# EAGLE library part 2173157-3_2173157-3 (library HA_FONA_LARA_20)
Conn Micro USB 2.0 Type B RCP 5 POS 0.65mm Solder RA SMD 5 Terminal 1 Port T/R Check prices <https://pricing.snapeda.com/search/part/2173157-3/?ref=eda>
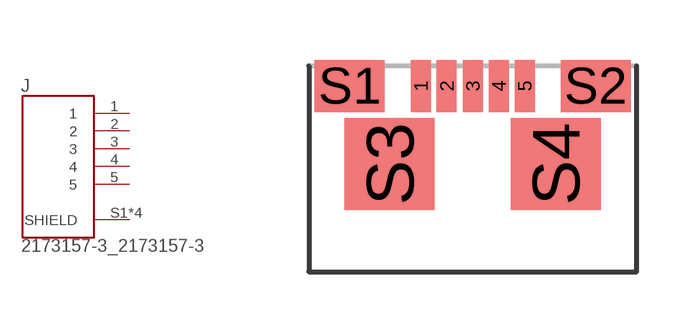
[diagram p0: symbol with the pads of 2173157-3_CONN_2173157-3; footprint 2173157-3_CONN_2173157-3]

Designator prefix J

## 2173157-3_2173157-3 (AVAILABILITY: Good; CENTERLINE_PITCH: .65 mm[.025 in]; COMMENT: 2173157-3; DESCRIPTION: Conn Micro USB 2.0 Type B RCP 5 POS 0.65mm Solder RA SMD 5 Terminal 1 Port T/R; EU_ROHS_COMPLIANCE: Compliant; MF: TE Connectivity; MP: 2173157-3; NUMBER_OF_POSITIONS: 5; PACKAGE: None; PRICE: None; PRODUCT_TYPE: Connector; PURCHASE-URL: https://pricing.snapeda.com/search/part/2173157-3/?ref=eda)  [2173157-3_CONN_2173157-3]
1  1  pas
2  2  pas
3  3  pas
4  4  pas
5  5  pas
S1  SHIELD  pas
S2  SHIELD  pas
S3  SHIELD  pas
S4  SHIELD  pas

## Footprint 2173157-3_CONN_2173157-3 (pad centres in mm)
smd 0.5 x 1.3: 1 -1.3,0; 2 -0.65,0; 3 0,0; 4 0.65,0; 5 1.3,0
smd 1.75 x 1.3: S1 -3.075,0; S2 3.075,0
smd 2.25 x 2.3: S3 -2.075,-1.95; S4 2.075,-1.95